# Altium schematic symbol library QSTL_QD4_2SET_38PAD.SchLib: 1 symbol
Pins are listed as number, name and electrical type; pins without a type are passive.

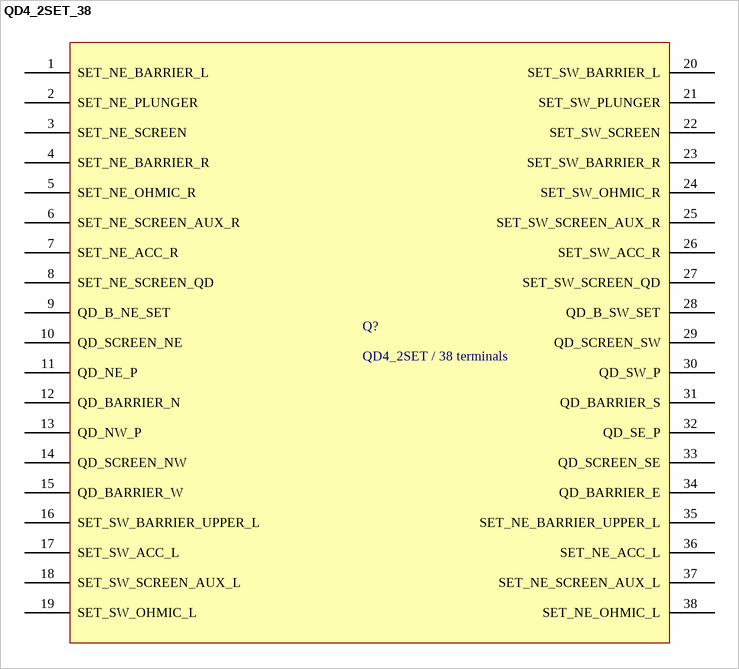
[diagram p0: symbol QD4_2SET_38]

## QD4_2SET_38
designator Q?, comment QD4_2SET / 38 terminals
38-terminal QD4_2SET wire-bond component
pins: 1 SET_NE_BARRIER_L, 2 SET_NE_PLUNGER, 3 SET_NE_SCREEN, 4 SET_NE_BARRIER_R, 5 SET_NE_OHMIC_R, 6 SET_NE_SCREEN_AUX_R, 7 SET_NE_ACC_R, 8 SET_NE_SCREEN_QD, 9 QD_B_NE_SET, 10 QD_SCREEN_NE, 11 QD_NE_P, 12 QD_BARRIER_N, 13 QD_NW_P, 14 QD_SCREEN_NW, 15 QD_BARRIER_W, 16 SET_SW_BARRIER_UPPER_L, 17 SET_SW_ACC_L, 18 SET_SW_SCREEN_AUX_L, 19 SET_SW_OHMIC_L, 20 SET_SW_BARRIER_L, 21 SET_SW_PLUNGER, 22 SET_SW_SCREEN, 23 SET_SW_BARRIER_R, 24 SET_SW_OHMIC_R, 25 SET_SW_SCREEN_AUX_R, 26 SET_SW_ACC_R, 27 SET_SW_SCREEN_QD, 28 QD_B_SW_SET, 29 QD_SCREEN_SW, 30 QD_SW_P, 31 QD_BARRIER_S, 32 QD_SE_P, 33 QD_SCREEN_SE, 34 QD_BARRIER_E, 35 SET_NE_BARRIER_UPPER_L, 36 SET_NE_ACC_L, 37 SET_NE_SCREEN_AUX_L, 38 SET_NE_OHMIC_L